# Altium schematic symbol library GY-BMI160.SchLib: 1 symbol
Pins are listed as number, name and electrical type; pins without a type are passive.

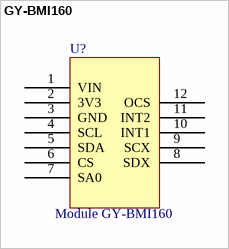
[diagram p0: symbol GY-BMI160]

## GY-BMI160
designator U?, comment Module GY-BMI160
footprint GY-BMI160 (IMU Module GY-BMI160)
pins: 1 VIN, 2 3V3, 3 GND, 4 SCL, 5 SDA, 6 CS, 7 SA0, 8 SDX, 9 SCX, 10 INT1, 11 INT2, 12 OCS